# Altium footprint library INDC2016X80N.PcbLib: 1 footprints
Each footprint in its own frame and in the unit in brackets; x right, y up, seen from the top. Pads: shape width x height; smd on the part's side, far side on the other; paste and mask are expansions set on the pad; w line width, h text height; cw(c..) or ccw(c..) is an arc to the next point about the centre after c.
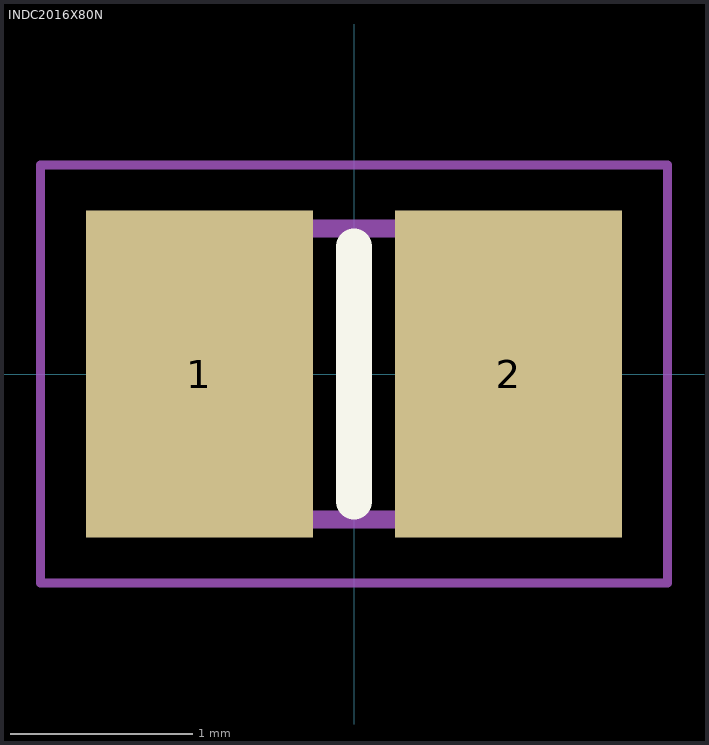
[diagram p0: the footprint, top view; thin cyan lines are the x and y axes]

## INDC2016X80N [mm]
pads (2):
  rect 1.25x1.8 smd: 1(-0.85,0) 2(0.85,0)
Top Overlay:
  lines w0.2: 0,-0.7 0,0.7
Mechanical 15:
  lines w0.1: -1,-0.8 -1,0.8 1,0.8 1,-0.8 -1,-0.8
Mechanical 20:
  lines w0.05: -1.725,-1.15 -1.725,1.15 1.725,1.15 1.725,-1.15 -1.725,-1.15
3D body "AOTA-B201608S1R0MT.stp": height 0.8, standoff 0, extent -1,-0.8 1,0.8